# Altium schematic symbol library Vibration_Datalogger.SchLib: 75 symbols (part 3 of 7)
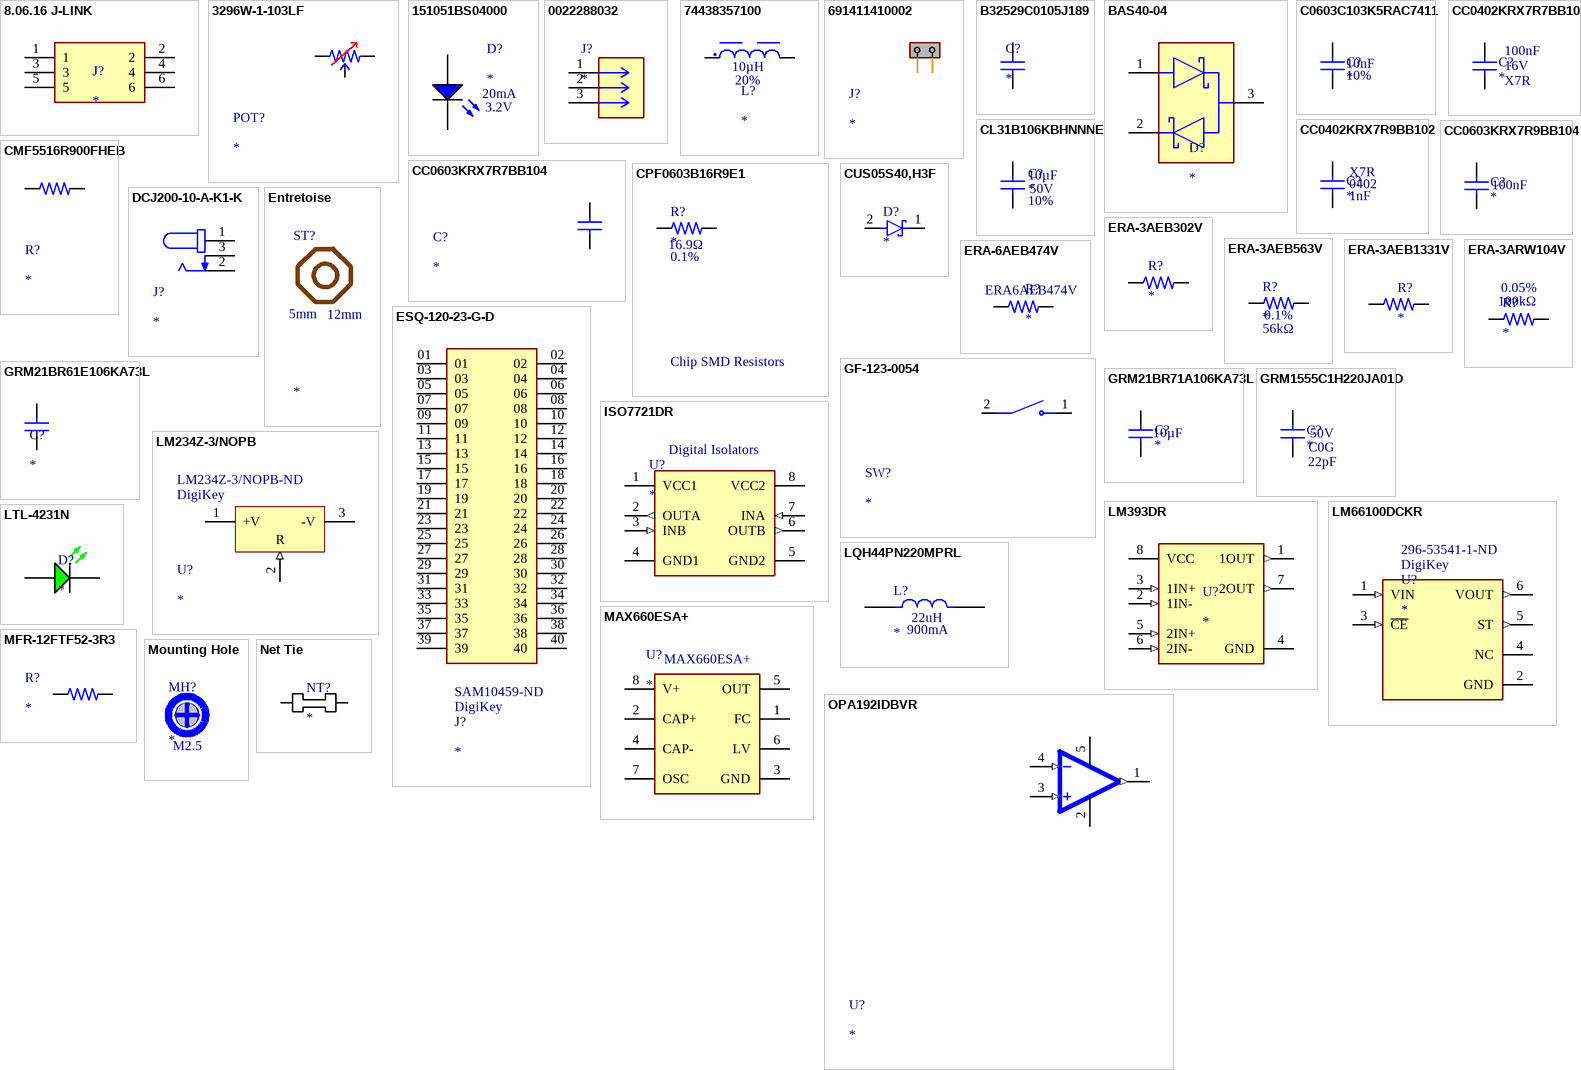
[diagram p3: symbols 8.06.16 J-LINK to OPA192IDBVR]

## ERA-3AEB1331V
designator R?
RES SMD 1.33KOHM 0.1% 1/10W 0603; Manufacturer Lifecycle Status: ACTIVE; Part Series: Thin Film Chip Resistors, High Reliability Type; Manufacturer: Panasonic; Manufacturer Part Number: ERA3AEB1331V; Max Power Dissipation: 100mW; Resistance: 1.33kΩ; Temperature Coefficient: 25ppm/°C; Voltage Rating: 150V; Voltage Rating (DC): 75V; Case/Package: 0603; Case Code (Imperial): 0603; Case Code (Metric): 1608; Composition: Thin Film; Contact Plating: Tin; Depth: 800µm; Features: Automotive AEC-Q200; Height: 450µm; Height - Seated (Max): 558.8µm; Lead Free: Lead Free; Length: 1.6mm; Lifecycle Status: Production; Max Operating Temperature: 155°C; Military Standard: Not; Min Operating Temperature: -55°C; Mount: Surface Mount; Number of Pins: 2; Number of Terminals: 2; Number of Terminations: 2; Packaging: Tape & Reel; Power Rating: 100mW; Radiation Hardening: No; Ratings: AEC-Q200; REACH SVHC: Yes; Schedule B: 8533210045, 8533210045|8533210045, 8533210045|8533210045|8533210045, 8533210045|8533210045|8533210045|8533210045; Termination: SMD/SMT; Tolerance: 0.1%; Width: 800µm; Working Voltage: 75V; ComponentLink1URL: https://datasheet.octopart.com:443/ERA3AEB1331V-Panasonic-datasheet-181959660.pdf?src-supplier=IHS; ComponentLink1Description: https://datasheet.octopart.com:443/ERA3AEB1331V-Panasonic-datasheet-181959660.pdf?src-supplier=IHS; ComponentLink2URL: https://datasheet.octopart.com:443/ERA3AEB1331V-Panasonic-datasheet-62287448.pdf?src-supplier=Newark; ComponentLink2Description: https://datasheet.octopart.com:443/ERA3AEB1331V-Panasonic-datasheet-62287448.pdf?src-supplier=Newark; ComponentLink3URL: https://datasheet.octopart.com:443/ERA3AEB1331V-Panasonic-datasheet-136531316.pdf?src-supplier=Newark; ComponentLink3Description: https://datasheet.octopart.com:443/ERA3AEB1331V-Panasonic-datasheet-136531316.pdf?src-supplier=Newark; ComponentLink4URL: https://datasheet.octopart.com:443/ERA-3AEB1331V-Panasonic-datasheet-154766165.pdf?src-supplier=Master+Electronics; ComponentLink4Description: https://datasheet.octopart.com:443/ERA-3AEB1331V-Panasonic-datasheet-154766165.pdf?src-supplier=Master+Electronics; ComponentLink5URL: https://datasheet.octopart.com:443/ERA3AEB1331V-Panasonic-datasheet-8367715.pdf?src-supplier=Farnell; ComponentLink5Description: https://datasheet.octopart.com:443/ERA3AEB1331V-Panasonic-datasheet-8367715.pdf?src-supplier=Farnell; ComponentLink6URL: https://datasheet.octopart.com:443/ERA3AEB1331V-Panasonic---ECG-datasheet-15994758.pdf?src-supplier=Farnell; ComponentLink6Description: https://datasheet.octopart.com:443/ERA3AEB1331V-Panasonic---ECG-datasheet-15994758.pdf?src-supplier=Farnell; ComponentLink7URL: https://datasheet.octopart.com:443/ERA3AEB1331V-Panasonic-datasheet-188913046.pdf?src-supplier=TME; ComponentLink7Description: https://datasheet.octopart.com:443/ERA3AEB1331V-Panasonic-datasheet-188913046.pdf?src-supplier=TME; ComponentLink8URL: https://sigma.octopart.com:443/150570796/technical_drawing/Panasonic-ERA3AEB1331V.pdf?src-supplier=Panasonic+SCT; ComponentLink8Description: https://sigma.octopart.com:443/150570796/technical_drawing/Panasonic-ERA3AEB1331V.pdf?src-supplier=Panasonic+SCT; ComponentLink9URL: https://datasheet.octopart.com:443/ERA3AEB1331V-Panasonic-datasheet-138783076.pdf?src-supplier=Burklin+Elektronik; ComponentLink9Description: https://datasheet.octopart.com:443/ERA3AEB1331V-Panasonic-datasheet-138783076.pdf?src-supplier=Burklin+Elektronik; ComponentLink10URL: https://datasheet.octopart.com/ERA3AEB1331V-Panasonic-datasheet-78375410.pdf; ComponentLink10Description: https://datasheet.octopart.com/ERA3AEB1331V-Panasonic-datasheet-78375410.pdf; ComponentLink11URL: https://datasheet.octopart.com:443/ERA-3AEB1331V-Panasonic-datasheet-62096640.pdf?src-supplier=Future+Electronics; ComponentLink11Description: https://datasheet.octopart.com:443/ERA-3AEB1331V-Panasonic-datasheet-62096640.pdf?src-supplier=Future+Electronics; ComponentLink12URL: https://datasheet.octopart.com:443/ERA3AEB1331V-Panasonic-datasheet-13266200.pdf?src-supplier=Electro+Sonic; ComponentLink12Description: https://datasheet.octopart.com:443/ERA3AEB1331V-Panasonic-datasheet-13266200.pdf?src-supplier=Electro+Sonic; ComponentLink13URL: https://datasheet.octopart.com:443/ERA3AEB1331V-Panasonic-datasheet-33006989.pdf?src-supplier=Electro+Sonic; ComponentLink13Description: https://datasheet.octopart.com:443/ERA3AEB1331V-Panasonic-datasheet-33006989.pdf?src-supplier=Electro+Sonic; ComponentLink14URL: https://datasheet.octopart.com:443/ERA-3AEB1331V-Panasonic-datasheet-46744048.pdf?src-supplier=Electro+Sonic; ComponentLink14Description: https://datasheet.octopart.com:443/ERA-3AEB1331V-Panasonic-datasheet-46744048.pdf?src-supplier=Electro+Sonic; Supplier 1: DigiKey; Supplier Part Number 1: P1.33KDBDKR-ND; Category: Chip SMD Resistors
footprint ERA-3AEB1331V (RES SMD 1.33KOHM 0.1% 1/10W 0603)
pins: 1, 2

## ERA-3ARW104V
designator R?  Tolerance: 0.05%  Resistance: 100kΩ
RES SMD 100KOHM 0.05% 1/10W 0603; Manufacturer Lifecycle Status: ACTIVE; Part Series: Thin Film Chip Resistors, High Reliability Type; Manufacturer: Panasonic; Manufacturer Part Number: ERA3ARW104V; Max Power Dissipation: 100mW; Temperature Coefficient: 10ppm/°C; Voltage Rating: 150V; Voltage Rating (DC): 75V; Case/Package: 0603; Case Code (Imperial): 0603; Case Code (Metric): 1608; Composition: Metal Film, Thin Film; Contact Plating: Tin; Depth: 800µm; Height: 450µm; Lead Free: Lead Free; Length: 1.6mm; Lifecycle Status: Production; Max Operating Temperature: 155°C; Military Standard: Not; Min Operating Temperature: -55°C; Mount: Surface Mount; Number of Pins: 2; Number of Terminals: 2; Number of Terminations: 2; Packaging: Cut Tape; Power Dissipation: 100mW; Power Rating: 100mW; Radiation Hardening: No; Ratings: AEC-Q200; REACH SVHC: Yes; Schedule B: 8533210045, 8533210045|8533210045|8533210045|8533210045|8533210045|8533210045|8533210045|8533210045|8533210045|8533210045|8533210045|8533210045|8533210045|8533210045|8533210045|8533210045|8533210045|8533210045|8533210045|8533210045|8533210045|8533210045|8533210045|85; Width: 800µm; Working Voltage: 75V; ComponentLink1URL: https://datasheet.octopart.com:443/ERA3ARW104V-Panasonic-datasheet-181959660.pdf?src-supplier=IHS; ComponentLink1Description: https://datasheet.octopart.com:443/ERA3ARW104V-Panasonic-datasheet-181959660.pdf?src-supplier=IHS; ComponentLink2URL: https://datasheet.octopart.com:443/ERA3ARW104V-Panasonic-datasheet-62287448.pdf?src-supplier=Future+Electronics; ComponentLink2Description: https://datasheet.octopart.com:443/ERA3ARW104V-Panasonic-datasheet-62287448.pdf?src-supplier=Future+Electronics; ComponentLink3URL: https://datasheet.octopart.com:443/ERA3ARW104V-Panasonic-datasheet-136531316.pdf?src-supplier=Newark; ComponentLink3Description: https://datasheet.octopart.com:443/ERA3ARW104V-Panasonic-datasheet-136531316.pdf?src-supplier=Newark; ComponentLink4URL: https://datasheet.octopart.com:443/ERA3ARW104V-Panasonic-datasheet-5310081.pdf?src-supplier=Newark; ComponentLink4Description: https://datasheet.octopart.com:443/ERA3ARW104V-Panasonic-datasheet-5310081.pdf?src-supplier=Newark; ComponentLink5URL: https://datasheet.octopart.com:443/ERA-3ARW104V-Panasonic-datasheet-154766165.pdf?src-supplier=Master+Electronics; ComponentLink5Description: https://datasheet.octopart.com:443/ERA-3ARW104V-Panasonic-datasheet-154766165.pdf?src-supplier=Master+Electronics; ComponentLink6URL: https://datasheet.octopart.com:443/ERA3ARW104V-Panasonic-datasheet-13266200.pdf?src-supplier=Electro+Sonic; ComponentLink6Description: https://datasheet.octopart.com:443/ERA3ARW104V-Panasonic-datasheet-13266200.pdf?src-supplier=Electro+Sonic; ComponentLink7URL: https://datasheet.octopart.com:443/ERA-3ARW104V-Panasonic-datasheet-33006989.pdf?src-supplier=Electro+Sonic; ComponentLink7Description: https://datasheet.octopart.com:443/ERA-3ARW104V-Panasonic-datasheet-33006989.pdf?src-supplier=Electro+Sonic; ComponentLink8URL: https://sigma.octopart.com:443/150570796/technical_drawing/Panasonic-ERA3ARW104V.pdf?src-supplier=Panasonic+SCT; ComponentLink8Description: https://sigma.octopart.com:443/150570796/technical_drawing/Panasonic-ERA3ARW104V.pdf?src-supplier=Panasonic+SCT; ComponentLink9URL: https://datasheet.octopart.com/ERA3ARW104V-Panasonic-datasheet-78375410.pdf; ComponentLink9Description: https://datasheet.octopart.com/ERA3ARW104V-Panasonic-datasheet-78375410.pdf; Category: Chip SMD Resistors; Supplier 1: DigiKey; Supplier Part Number 1: P100KBECT-ND
footprint ERA-3ARW104V (RES SMD 100KOHM 0.05% 1/10W 0603)
pins: 1, 2

## ERA-6AEB474V
designator R?  Manufacturer Part Number: ERA6AEB474V
RES SMD 470K OHM 0.1% 1/8W 0805; Manufacturer Lifecycle Status: ACTIVE; Part Series: Thin Film Chip Resistors, High Reliability Type; Manufacturer: Panasonic; Max Power Dissipation: 125mW; Resistance: 470kΩ; Temperature Coefficient: 25ppm/°C; Voltage Rating: 100V; Case/Package: 0805; Case Code (Imperial): 0805; China RoHS: Non-Compliant; Composition: Metal Film, Thin Film; Contact Plating: Tin; Country of Origin: Japan; Depth: 1.25mm; Export Control Classification Number (ECCN) Code: EAR99; Features: Automotive AEC-Q200; Height: 500µm; Harmonized Tariff Schedule (HTS) Code: 8533.21.00.30; Introduction Date: 2006-05-29; Lead Free: Lead Free; Length: 2mm; Lifecycle Status: Production; Max Operating Temperature: 155°C; Military Standard: Not; Min Operating Temperature: -55°C; Mount: Surface Mount; Number of Pins: 2; Number of Terminals: 2; Number of Terminations: 2; Packaging: Cut Tape; Power Dissipation: 125mW; Power Rating: 125mW; Radiation Hardening: No; REACH SVHC: Yes; Schedule B: 8533210045, 8533210045|8533210045|8533210045|8533210045|8533210045; Termination: SMD/SMT; Tolerance: 0.1%; Voltage Rating (DC): 100V; Width: 1.25mm; Working Voltage: 100V; ComponentLink1URL: https://datasheet.octopart.com:443/ERA6AEB474V-Panasonic-datasheet-181959660.pdf?src-supplier=IHS; ComponentLink1Description: https://datasheet.octopart.com:443/ERA6AEB474V-Panasonic-datasheet-181959660.pdf?src-supplier=IHS; ComponentLink2URL: https://datasheet.octopart.com/ERA6AEB474V-Panasonic-datasheet-62287448.pdf; ComponentLink2Description: https://datasheet.octopart.com/ERA6AEB474V-Panasonic-datasheet-62287448.pdf; ComponentLink3URL: https://datasheet.octopart.com/ERA6AEB474V-Panasonic-datasheet-78375410.pdf; ComponentLink3Description: https://datasheet.octopart.com/ERA6AEB474V-Panasonic-datasheet-78375410.pdf; ComponentLink4URL: https://datasheet.octopart.com:443/ERA6AEB474V-Panasonic-datasheet-136531316.pdf?src-supplier=Newark; ComponentLink4Description: https://datasheet.octopart.com:443/ERA6AEB474V-Panasonic-datasheet-136531316.pdf?src-supplier=Newark; ComponentLink5URL: https://datasheet.octopart.com:443/ERA-6AEB474V-Panasonic-datasheet-8367715.pdf?src-supplier=Newark; ComponentLink5Description: https://datasheet.octopart.com:443/ERA-6AEB474V-Panasonic-datasheet-8367715.pdf?src-supplier=Newark; ComponentLink6URL: https://datasheet.octopart.com:443/ERA-6AEB474V-Panasonic-datasheet-61114971.pdf?src-supplier=Newark; ComponentLink6Description: https://datasheet.octopart.com:443/ERA-6AEB474V-Panasonic-datasheet-61114971.pdf?src-supplier=Newark; ComponentLink7URL: https://datasheet.octopart.com:443/ERA6AEB474V-Panasonic-datasheet-118567.pdf?src-supplier=element14; ComponentLink7Description: https://datasheet.octopart.com:443/ERA6AEB474V-Panasonic-datasheet-118567.pdf?src-supplier=element14; ComponentLink8URL: https://datasheet.octopart.com:443/ERA-6AEB474V-Panasonic-datasheet-154766165.pdf?src-supplier=JRH+Electronics; ComponentLink8Description: https://datasheet.octopart.com:443/ERA-6AEB474V-Panasonic-datasheet-154766165.pdf?src-supplier=JRH+Electronics; ComponentLink9URL: https://datasheet.octopart.com:443/ERA6AEB474V-Panasonic-datasheet-188913046.pdf?src-supplier=TME; ComponentLink9Description: https://datasheet.octopart.com:443/ERA6AEB474V-Panasonic-datasheet-188913046.pdf?src-supplier=TME; ComponentLink10URL: https://sigma.octopart.com:443/150570796/technical_drawing/Panasonic-ERA6AEB474V.pdf?src-supplier=Panasonic+SCT; ComponentLink10Description: https://sigma.octopart.com:443/150570796/technical_drawing/Panasonic-ERA6AEB474V.pdf?src-supplier=Panasonic+SCT; ComponentLink11URL: https://datasheet.octopart.com:443/ERA6AEB474V-Panasonic-datasheet-138783076.pdf?src-supplier=Burklin+Elektronik; ComponentLink11Description: https://datasheet.octopart.com:443/ERA6AEB474V-Panasonic-datasheet-138783076.pdf?src-supplier=Burklin+Elektronik; ComponentLink12URL: https://datasheet.octopart.com:443/ERA6AEB474V-Panasonic---ECG-datasheet-15994758.pdf?src-supplier=Farnell; ComponentLink12Description: https://datasheet.octopart.com:443/ERA6AEB474V-Panasonic---ECG-datasheet-15994758.pdf?src-supplier=Farnell; ComponentLink13URL: https://datasheet.octopart.com:443/ERA-6AEB474V-Panasonic-datasheet-13266200.pdf?src-supplier=Electro+Sonic; ComponentLink13Description: https://datasheet.octopart.com:443/ERA-6AEB474V-Panasonic-datasheet-13266200.pdf?src-supplier=Electro+Sonic; ComponentLink14URL: https://datasheet.octopart.com:443/ERA-6AEB474V-Panasonic-datasheet-33006989.pdf?src-supplier=Electro+Sonic; ComponentLink14Description: https://datasheet.octopart.com:443/ERA-6AEB474V-Panasonic-datasheet-33006989.pdf?src-supplier=Electro+Sonic; ComponentLink15URL: https://datasheet.octopart.com:443/ERA-6AEB474V-Panasonic-datasheet-46744048.pdf?src-supplier=Electro+Sonic; ComponentLink15Description: https://datasheet.octopart.com:443/ERA-6AEB474V-Panasonic-datasheet-46744048.pdf?src-supplier=Electro+Sonic; Supplier 1: DigiKey; Supplier Part Number 1: P470KDACT-ND; Category: Chip SMD Resistors
footprint ERA-6AEB474V (RES SMD 470K OHM 0.1% 1/8W 0805)
pins: 1, 2

## ESQ-120-23-G-D
designator J?  Supplier 1: DigiKey  Supplier Part Number 1: SAM10459-ND
CONN SOCKET 40POS 0.1 GOLD PCB
footprint ESQ-120-23-G-D (CONN SOCKET 40POS 0.1 GOLD PCB)
pins: 01, 02, 03, 04, 05, 06, 07, 08, 09, 10, 11, 12, 13, 14, 15, 16, 17, 18, 19, 20, 21, 22, 23, 24, 25, 26, 27, 28, 29, 30, 31, 32, 33, 34, 35, 36, 37, 38, 39, 40

## GF-123-0054
designator SW?
SWITCH SLIDE SPST 8.5A 125V; Manufacturer: CW Industries; Manufacturer Part Number: GF-123-0054; Actuator Length: 5.08mm; Actuator Material: Nylon, Polyamide; Electrical Life: 6kcycles; Mechanical Life: 10kcycles; Number of Positions: 1; Switch Function: On-Off; Switch Travel: 3.61mm; Contact Material: Copper; Contact Plating: Silver; Country of Origin: USA; Current Rating: 8.5A; Export Control Classification Number (ECCN) Code: EAR99; Height: 8.51mm; Harmonized Tariff Schedule (HTS) Code: 8536.50.90.50; Introduction Date: 2016-05-13; Length: 16.46mm; Lifecycle Status: Production; Max Operating Temperature: 104°C; Min Operating Temperature: -10°C; Mount: Through Hole; REACH SVHC: Yes; Termination: Solder; Throw Configuration: SPST; Voltage Rating (AC): 125V; Voltage Rating (DC): 125V; ComponentLink1URL: https://datasheet.octopart.com:443/GF-123-0054-CW-Industries-datasheet-180444882.pdf?src-supplier=IHS; ComponentLink1Description: https://datasheet.octopart.com:443/GF-123-0054-CW-Industries-datasheet-180444882.pdf?src-supplier=IHS; ComponentLink2URL: https://datasheet.octopart.com:443/GF-123-0054-CW-Industries-datasheet-159152559.pdf?src-supplier=Master+Electronics; ComponentLink2Description: https://datasheet.octopart.com:443/GF-123-0054-CW-Industries-datasheet-159152559.pdf?src-supplier=Master+Electronics; Supplier 1: DigiKey; Supplier Part Number 1: CWI333-ND; Category: Slide Switches
footprint GF-123-0054 (SWITCH SLIDE SPST 8.5A 125V)
pins: 1, 2

## GRM21BR61E106KA73L
designator C?
CAP CER 10UF 25V X5R 0805; Manufacturer Lifecycle Status: IN PRODUCTION; Manufacturer: Murata; Manufacturer Part Number: GRM21BR61E106KA73L; Capacitance: 10µF; Dielectric Material: Ceramic; Tolerance: 10%; Case/Package: 0805; Case Code (Imperial): 0805; Case Code (Metric): 2012; Country of Origin: Japan, Mainland China, Philippines, Singapore, Thailand; Depth: 1.25mm; Dielectric: X5R; Export Control Classification Number (ECCN) Code: EAR99; Height: 1.25mm; Harmonized Tariff Schedule (HTS) Code: 8532.24.00.20; Introduction Date: 2012-06-14; Lead Free: Lead Free; Length: 2mm; Lifecycle Status: Production; Material: Ceramic; Max Operating Temperature: 85°C; Min Operating Temperature: -55°C; Mount: Surface Mount; Number of Pins: 2; Number of Terminals: 2; Radiation Hardening: No; REACH SVHC: Yes; Schedule B: 8532240020, 8532240020|8532240020, 8532240020|8532240020|8532240020, 8532240020|8532240020|8532240020|8532240020; Termination: SMD/SMT; Thickness: 1.25mm; Voltage: 25V; Voltage Rating: 25V; Voltage Rating (DC): 25V; Width: 1.25mm; ComponentLink1URL: https://datasheet.octopart.com:443/GRM21BR61E106KA73L-Murata-datasheet-99353849.pdf?src-supplier=Upverter; ComponentLink1Description: https://datasheet.octopart.com:443/GRM21BR61E106KA73L-Murata-datasheet-99353849.pdf?src-supplier=Upverter; ComponentLink2URL: https://datasheet.octopart.com:443/GRM21BR61E106KA73L-Murata-datasheet-8080374.pdf?src-supplier=Upverter; ComponentLink2Description: https://datasheet.octopart.com:443/GRM21BR61E106KA73L-Murata-datasheet-8080374.pdf?src-supplier=Upverter; ComponentLink3URL: https://datasheet.octopart.com:443/GRM21BR61E106KA73L-Murata-datasheet-10030887.pdf?src-supplier=element14+APAC; ComponentLink3Description: https://datasheet.octopart.com:443/GRM21BR61E106KA73L-Murata-datasheet-10030887.pdf?src-supplier=element14+APAC; ComponentLink4URL: https://datasheet.octopart.com:443/GRM21BR61E106KA73L-Murata-datasheet-62320250.pdf?src-supplier=element14+APAC; ComponentLink4Description: https://datasheet.octopart.com:443/GRM21BR61E106KA73L-Murata-datasheet-62320250.pdf?src-supplier=element14+APAC; ComponentLink5URL: https://datasheet.octopart.com:443/GRM21BR61E106KA73L-Murata-datasheet-141278247.pdf?src-supplier=Geoflip; ComponentLink5Description: https://datasheet.octopart.com:443/GRM21BR61E106KA73L-Murata-datasheet-141278247.pdf?src-supplier=Geoflip; ComponentLink6URL: https://datasheet.octopart.com/GRM21BR61E106KA73L-Murata-datasheet-12515295.pdf; ComponentLink6Description: https://datasheet.octopart.com/GRM21BR61E106KA73L-Murata-datasheet-12515295.pdf; ComponentLink7URL: https://datasheet.octopart.com/GRM21BR61E106KA73L-Murata-datasheet-12510076.pdf; ComponentLink7Description: https://datasheet.octopart.com/GRM21BR61E106KA73L-Murata-datasheet-12510076.pdf; ComponentLink8URL: https://datasheet.octopart.com/GRM21BR61E106KA73L-Murata-datasheet-11978611.pdf; ComponentLink8Description: https://datasheet.octopart.com/GRM21BR61E106KA73L-Murata-datasheet-11978611.pdf; ComponentLink9URL: https://datasheet.octopart.com/GRM21BR61E106KA73L-Murata-datasheet-10025737.pdf; ComponentLink9Description: https://datasheet.octopart.com/GRM21BR61E106KA73L-Murata-datasheet-10025737.pdf; ComponentLink10URL: https://datasheet.octopart.com/GRM21BR61E106KA73L-Murata-datasheet-8819587.pdf; ComponentLink10Description: https://datasheet.octopart.com/GRM21BR61E106KA73L-Murata-datasheet-8819587.pdf; ComponentLink11URL: https://datasheet.octopart.com/GRM21BR61E106KA73L-Murata-datasheet-14397508.pdf; ComponentLink11Description: https://datasheet.octopart.com/GRM21BR61E106KA73L-Murata-datasheet-14397508.pdf; ComponentLink12URL: https://datasheet.octopart.com:443/GRM21BR61E106KA73L-Murata-datasheet-11549874.pdf?src-supplier=Seeed+Studio; ComponentLink12Description: https://datasheet.octopart.com:443/GRM21BR61E106KA73L-Murata-datasheet-11549874.pdf?src-supplier=Seeed+Studio; ComponentLink13URL: https://datasheet.octopart.com:443/GRM21BR61E106KA73L-Murata-datasheet-17853673.pdf?src-supplier=Newark; ComponentLink13Description: https://datasheet.octopart.com:443/GRM21BR61E106KA73L-Murata-datasheet-17853673.pdf?src-supplier=Newark; ComponentLink14URL: https://datasheet.octopart.com:443/GRM21BR61E106KA73L-Murata-datasheet-165579666.pdf?src-supplier=TME; ComponentLink14Description: https://datasheet.octopart.com:443/GRM21BR61E106KA73L-Murata-datasheet-165579666.pdf?src-supplier=TME; ComponentLink15URL: https://datasheet.octopart.com:443/GRM21BR61E106KA73L-Murata-datasheet-59876780.pdf?src-supplier=TME; ComponentLink15Description: https://datasheet.octopart.com:443/GRM21BR61E106KA73L-Murata-datasheet-59876780.pdf?src-supplier=TME; ComponentLink16URL: https://datasheet.octopart.com:443/GRM21BR61E106KA73L-Murata-datasheet-140707569.pdf?src-supplier=Ciiva; ComponentLink16Description: https://datasheet.octopart.com:443/GRM21BR61E106KA73L-Murata-datasheet-140707569.pdf?src-supplier=Ciiva; ComponentLink17URL: https://datasheet.octopart.com:443/GRM21BR61E106KA73L-Murata-datasheet-138744870.pdf?src-supplier=Ciiva; ComponentLink17Description: https://datasheet.octopart.com:443/GRM21BR61E106KA73L-Murata-datasheet-138744870.pdf?src-supplier=Ciiva; ComponentLink18URL: https://datasheet.octopart.com:443/GRM21BR61E106KA73L-Murata-datasheet-22122223.pdf?src-supplier=Future+Electronics; ComponentLink18Description: https://datasheet.octopart.com:443/GRM21BR61E106KA73L-Murata-datasheet-22122223.pdf?src-supplier=Future+Electronics; ComponentLink19URL: https://datasheet.octopart.com:443/GRM21BR61E106KA73L-Murata-datasheet-12551729.pdf?src-supplier=Future+Electronics; ComponentLink19Description: https://datasheet.octopart.com:443/GRM21BR61E106KA73L-Murata-datasheet-12551729.pdf?src-supplier=Future+Electronics; ComponentLink20URL: https://datasheet.octopart.com:443/GRM21BR61E106KA73L-Murata-datasheet-7550257.pdf?src-supplier=Farnell; ComponentLink20Description: https://datasheet.octopart.com:443/GRM21BR61E106KA73L-Murata-datasheet-7550257.pdf?src-supplier=Farnell; ComponentLink21URL: http://sigma.octopart.com:80/reach_statement/Murata-company-16.pdf?src-supplier=Compliance+Statements; ComponentLink21Description: http://sigma.octopart.com:80/reach_statement/Murata-company-16.pdf?src-supplier=Compliance+Statements; Supplier 1: DigiKey; Supplier Part Number 1: 490-5523-1-ND; Category: Ceramic Capacitors
footprint GRM21BR61E106KA73L (CAP CER 10UF 25V X5R 0805)
pins: 1 P, 2 N

## GRM21BR71A106KA73L
designator C?  Capacitance: 10µF
CAP CER 10UF 10V X7R 0805; Manufacturer Lifecycle Status: IN PRODUCTION; Manufacturer Package Identifier: 0805 (2012 metric); Manufacturer: Murata; Manufacturer Part Number: GRM21BR71A106KA73L; Dielectric Material: Ceramic; Tolerance: 10%; Case/Package: 0805; Case Code (Imperial): 0805; Case Code (Metric): 2012; Country of Origin: Japan, Mainland China, Philippines, Singapore, Thailand; Depth: 1.25mm; Dielectric: X7R; Export Control Classification Number (ECCN) Code: EAR99; Height: 1.25mm; Harmonized Tariff Schedule (HTS) Code: 8532.24.00.20; Introduction Date: 2013-11-20; Length: 2mm; Lifecycle Status: Production; Material: Ceramic; Max Operating Temperature: 125°C; Min Operating Temperature: -55°C; Mount: Surface Mount; Number of Pins: 2; Number of Terminals: 2; REACH SVHC: Yes; Schedule B: 8532240020, 8532240020|8532240020, 8532240020|8532240020|8532240020, 8532240020|8532240020|8532240020|8532240020; Termination: SMD/SMT; Thickness: 1.25mm; Voltage Rating: 10V; Voltage Rating (DC): 10V; Weight: 9.49709mg; Width: 1.25mm; ComponentLink1URL: https://datasheet.octopart.com:443/GRM21BR71A106KA73L-Murata-datasheet-22122223.pdf?src-supplier=Upverter; ComponentLink1Description: https://datasheet.octopart.com:443/GRM21BR71A106KA73L-Murata-datasheet-22122223.pdf?src-supplier=Upverter; ComponentLink2URL: https://datasheet.octopart.com:443/GRM21BR71A106KA73L-Murata-datasheet-66077114.pdf?src-supplier=element14+APAC; ComponentLink2Description: https://datasheet.octopart.com:443/GRM21BR71A106KA73L-Murata-datasheet-66077114.pdf?src-supplier=element14+APAC; ComponentLink3URL: https://datasheet.octopart.com:443/GRM21BR71A106KA73L-Murata-datasheet-165579666.pdf?src-supplier=TME; ComponentLink3Description: https://datasheet.octopart.com:443/GRM21BR71A106KA73L-Murata-datasheet-165579666.pdf?src-supplier=TME; ComponentLink4URL: https://datasheet.octopart.com:443/GRM21BR71A106KA73L-Murata-datasheet-140707598.pdf?src-supplier=Ciiva; ComponentLink4Description: https://datasheet.octopart.com:443/GRM21BR71A106KA73L-Murata-datasheet-140707598.pdf?src-supplier=Ciiva; ComponentLink5URL: https://datasheet.octopart.com:443/GRM21BR71A106KA73L-Murata-datasheet-138744898.pdf?src-supplier=Ciiva; ComponentLink5Description: https://datasheet.octopart.com:443/GRM21BR71A106KA73L-Murata-datasheet-138744898.pdf?src-supplier=Ciiva; ComponentLink6URL: https://datasheet.octopart.com/GRM21BR71A106KA73L-Murata-datasheet-12515295.pdf; ComponentLink6Description: https://datasheet.octopart.com/GRM21BR71A106KA73L-Murata-datasheet-12515295.pdf; ComponentLink7URL: https://datasheet.octopart.com/GRM21BR71A106KA73L-Murata-datasheet-12510076.pdf; ComponentLink7Description: https://datasheet.octopart.com/GRM21BR71A106KA73L-Murata-datasheet-12510076.pdf; ComponentLink8URL: https://datasheet.octopart.com/GRM21BR71A106KA73L-Murata-datasheet-11978611.pdf; ComponentLink8Description: https://datasheet.octopart.com/GRM21BR71A106KA73L-Murata-datasheet-11978611.pdf; ComponentLink9URL: https://datasheet.octopart.com/GRM21BR71A106KA73L-Murata-datasheet-10025737.pdf; ComponentLink9Description: https://datasheet.octopart.com/GRM21BR71A106KA73L-Murata-datasheet-10025737.pdf; ComponentLink10URL: https://datasheet.octopart.com/GRM21BR71A106KA73L-Murata-datasheet-8819587.pdf; ComponentLink10Description: https://datasheet.octopart.com/GRM21BR71A106KA73L-Murata-datasheet-8819587.pdf; ComponentLink11URL: https://datasheet.octopart.com/GRM21BR71A106KA73L-Murata-datasheet-38883396.pdf; ComponentLink11Description: https://datasheet.octopart.com/GRM21BR71A106KA73L-Murata-datasheet-38883396.pdf; ComponentLink12URL: https://datasheet.octopart.com:443/GRM21BR71A106KA73L-Murata-datasheet-151172660.pdf?src-supplier=Arrow.cn; ComponentLink12Description: https://datasheet.octopart.com:443/GRM21BR71A106KA73L-Murata-datasheet-151172660.pdf?src-supplier=Arrow.cn; ComponentLink13URL: http://sigma.octopart.com:80/reach_statement/Murata-company-16.pdf?src-supplier=Compliance+Statements; ComponentLink13Description: http://sigma.octopart.com:80/reach_statement/Murata-company-16.pdf?src-supplier=Compliance+Statements; Supplier 1: DigiKey; Supplier Part Number 1: 490-10516-1-ND; Category: Ceramic Capacitors
footprint GRM21BR71A106KA73L (CAP CER 10UF 10V X7R 0805)
pins: 1 P, 2 N

## GRM1555C1H220JA01D
designator C?  Voltage: 50V  Dielectric: C0G  Capacitance: 22pF
CAP CER 22PF 50V C0G/NP0 0402; Manufacturer: Murata; Manufacturer Part Number: GRM1555C1H220JA01D; Dielectric Material: Ceramic; Tolerance: 5%; Case/Package: 0402; Case Code (Imperial): 0402; Case Code (Metric): 1005; Depth: 500µm; Height: 500µm; Lead Free: Lead Free; Length: 1mm; Lifecycle Status: Production; Material: Ceramic; Max Operating Temperature: 125°C; Min Operating Temperature: -55°C; Mount: Surface Mount; Number of Terminals: 2; Packaging: Cut Tape; Radiation Hardening: No; REACH SVHC: Yes; Schedule B: 8532240020, 8532240020|8532240020|8532240020|8532240020|8532240020; Termination: SMD/SMT; Thickness: 500µm; Voltage Rating: 50V; Voltage Rating (DC): 50V; Width: 500µm; ComponentLink1URL: https://datasheet.octopart.com:443/GRM1555C1H220JA01D-Murata-datasheet-141913788.pdf?src-supplier=Upverter; ComponentLink1Description: https://datasheet.octopart.com:443/GRM1555C1H220JA01D-Murata-datasheet-141913788.pdf?src-supplier=Upverter; ComponentLink2URL: https://datasheet.octopart.com:443/GRM1555C1H220JA01D-Murata-datasheet-12559435.pdf?src-supplier=element14+APAC; ComponentLink2Description: https://datasheet.octopart.com:443/GRM1555C1H220JA01D-Murata-datasheet-12559435.pdf?src-supplier=element14+APAC; ComponentLink3URL: https://datasheet.octopart.com:443/GRM1555C1H220JA01D-Murata-datasheet-62317060.pdf?src-supplier=element14+APAC; ComponentLink3Description: https://datasheet.octopart.com:443/GRM1555C1H220JA01D-Murata-datasheet-62317060.pdf?src-supplier=element14+APAC; ComponentLink4URL: https://datasheet.octopart.com:443/GRM1555C1H220JA01D-Murata-datasheet-141266224.pdf?src-supplier=Ciiva; ComponentLink4Description: https://datasheet.octopart.com:443/GRM1555C1H220JA01D-Murata-datasheet-141266224.pdf?src-supplier=Ciiva; ComponentLink5URL: https://datasheet.octopart.com:443/GRM1555C1H220JA01D-Murata-datasheet-140681354.pdf?src-supplier=Ciiva; ComponentLink5Description: https://datasheet.octopart.com:443/GRM1555C1H220JA01D-Murata-datasheet-140681354.pdf?src-supplier=Ciiva; ComponentLink6URL: https://datasheet.octopart.com:443/GRM1555C1H220JA01D-Murata-datasheet-138739516.pdf?src-supplier=Ciiva; ComponentLink6Description: https://datasheet.octopart.com:443/GRM1555C1H220JA01D-Murata-datasheet-138739516.pdf?src-supplier=Ciiva; ComponentLink7URL: https://datasheet.octopart.com:443/GRM1555C1H220JA01D-Murata-datasheet-120101189.pdf?src-supplier=Megastar; ComponentLink7Description: https://datasheet.octopart.com:443/GRM1555C1H220JA01D-Murata-datasheet-120101189.pdf?src-supplier=Megastar; ComponentLink8URL: https://datasheet.octopart.com:443/GRM1555C1H220JA01D-Murata-datasheet-81455556.pdf?src-supplier=TME; ComponentLink8Description: https://datasheet.octopart.com:443/GRM1555C1H220JA01D-Murata-datasheet-81455556.pdf?src-supplier=TME; ComponentLink9URL: https://datasheet.octopart.com:443/GRM1555C1H220JA01D-Murata-datasheet-22122223.pdf?src-supplier=Future+Electronics; ComponentLink9Description: https://datasheet.octopart.com:443/GRM1555C1H220JA01D-Murata-datasheet-22122223.pdf?src-supplier=Future+Electronics; ComponentLink10URL: https://datasheet.octopart.com:443/GRM1555C1H220JA01D-Murata-datasheet-12510170.pdf?src-supplier=Future+Electronics; ComponentLink10Description: https://datasheet.octopart.com:443/GRM1555C1H220JA01D-Murata-datasheet-12510170.pdf?src-supplier=Future+Electronics; ComponentLink11URL: https://datasheet.octopart.com:443/GRM1555C1H220JA01D-Murata-datasheet-8517407.pdf?src-supplier=Future+Electronics; ComponentLink11Description: https://datasheet.octopart.com:443/GRM1555C1H220JA01D-Murata-datasheet-8517407.pdf?src-supplier=Future+Electronics; ComponentLink12URL: https://datasheet.octopart.com:443/GRM1555C1H220JA01D-Murata-datasheet-8387045.pdf?src-supplier=Future+Electronics; ComponentLink12Description: https://datasheet.octopart.com:443/GRM1555C1H220JA01D-Murata-datasheet-8387045.pdf?src-supplier=Future+Electronics; ComponentLink13URL: https://datasheet.octopart.com:443/GRM1555C1H220JA01D-Murata-datasheet-8324201.pdf?src-supplier=Future+Electronics; ComponentLink13Description: https://datasheet.octopart.com:443/GRM1555C1H220JA01D-Murata-datasheet-8324201.pdf?src-supplier=Future+Electronics; ComponentLink14URL: https://datasheet.octopart.com:443/GRM1555C1H220JA01D-Murata-datasheet-7628724.pdf?src-supplier=Future+Electronics; ComponentLink14Description: https://datasheet.octopart.com:443/GRM1555C1H220JA01D-Murata-datasheet-7628724.pdf?src-supplier=Future+Electronics; ComponentLink15URL: https://datasheet.octopart.com:443/GRM1555C1H220JA01D-Murata-datasheet-552801.pdf?src-supplier=Future+Electronics; ComponentLink15Description: https://datasheet.octopart.com:443/GRM1555C1H220JA01D-Murata-datasheet-552801.pdf?src-supplier=Future+Electronics; ComponentLink16URL: https://datasheet.octopart.com:443/GRM1555C1H220JA01D-Murata-datasheet-44781475.pdf?src-supplier=Future+Electronics; ComponentLink16Description: https://datasheet.octopart.com:443/GRM1555C1H220JA01D-Murata-datasheet-44781475.pdf?src-supplier=Future+Electronics; ComponentLink17URL: https://datasheet.octopart.com/GRM1555C1H220JA01D-Murata-datasheet-12515295.pdf; ComponentLink17Description: https://datasheet.octopart.com/GRM1555C1H220JA01D-Murata-datasheet-12515295.pdf; ComponentLink18URL: https://datasheet.octopart.com/GRM1555C1H220JA01D-Murata-datasheet-12510076.pdf; ComponentLink18Description: https://datasheet.octopart.com/GRM1555C1H220JA01D-Murata-datasheet-12510076.pdf; ComponentLink19URL: https://datasheet.octopart.com/GRM1555C1H220JA01D-Murata-datasheet-11978611.pdf; ComponentLink19Description: https://datasheet.octopart.com/GRM1555C1H220JA01D-Murata-datasheet-11978611.pdf; ComponentLink20URL: https://datasheet.octopart.com/GRM1555C1H220JA01D-Murata-datasheet-10025737.pdf; ComponentLink20Description: https://datasheet.octopart.com/GRM1555C1H220JA01D-Murata-datasheet-10025737.pdf; ComponentLink21URL: https://datasheet.octopart.com/GRM1555C1H220JA01D-Murata-datasheet-8819587.pdf; ComponentLink21Description: https://datasheet.octopart.com/GRM1555C1H220JA01D-Murata-datasheet-8819587.pdf; ComponentLink22URL: https://datasheet.octopart.com/GRM1555C1H220JA01D-Murata-datasheet-14396388.pdf; ComponentLink22Description: https://datasheet.octopart.com/GRM1555C1H220JA01D-Murata-datasheet-14396388.pdf; ComponentLink23URL: http://sigma.octopart.com:80/reach_statement/Murata-company-16.pdf?src-supplier=Compliance+Statements; ComponentLink23Description: http://sigma.octopart.com:80/reach_statement/Murata-company-16.pdf?src-supplier=Compliance+Statements; Supplier Part Number 1: 490-5868-6-ND; Category: Ceramic Capacitors; Supplier 1: DigiKey
footprint GRM1555C1H220JA01D (CAP CER 22PF 50V C0G/NP0 0402)
pins: 1 P, 2 N

## ISO7721DR
designator U?  Category: Digital Isolators
DGTL ISOLTR 3KV 2CH GP 8-SOIC; Manufacturer Lifecycle Status: ACTIVE; Manufacturer: Texas Instruments; Manufacturer Part Number: ISO7721DR; Max Junction Temperature (Tj): 150°C; Max Supply Voltage: 5.5V; Min Supply Voltage: 2.25V; Number of Channels: 2; Ambient Temperature Range High: 125°C; Case/Package: SOIC; Height: 1.75mm; Length: 4.9mm; Lifecycle Status: Production; Max Operating Temperature: 125°C; Min Operating Temperature: -55°C; Number of Pins: 8; Schedule B: 8542390000; Thickness: 1.58mm; Width: 3.91mm; ComponentLink1URL: https://sigma.octopart.com:443/49249642/technical_drawing/Texas-Instruments-ISO7721DR.pdf?src-supplier=Texas+Instruments; ComponentLink1Description: https://sigma.octopart.com:443/49249642/technical_drawing/Texas-Instruments-ISO7721DR.pdf?src-supplier=Texas+Instruments; ComponentLink2URL: https://octopart.com:443/opatz8j6/c1?t=N4i5HTB15HvroLgDRCjPCIOLO4DzHH-fQ7glQtrdPT8sKYBxLvew8ldYt0gu1Pel5IQCJ2ZGdcFq2bwaeQ7N0Chny3VNsxZ6HuHivyfwJquNCYjdfOKu54ML7MfV023Ysdhw82XVyVOy21wx84OrzKQpnromuLfqbRUaNxLZ02VTg2_LKSTziiXX6iiXfCvXpXSEGq7Dxekm_jYx4fBYM5_MAdjqp1279_2INQEdLFzUa7b4C_IDFYUqO0fe7EAQa8YcTah4U8QRTj4XYb2n7LUQT2Lqk4_3jb4YPU1OmiSTSs3OhXIKqXgyrN1px5SDhoov6XcKqy42gYH0QjWerchXv21b-9W2m4NZyJWzqHCqOz-kWukKjjAVIfL9cPcO0XaB4IM&src-supplier=Texas+Instruments; ComponentLink2Description: https://octopart.com:443/opatz8j6/c1?t=N4i5HTB15HvroLgDRCjPCIOLO4DzHH-fQ7glQtrdPT8sKYBxLvew8ldYt0gu1Pel5IQCJ2ZGdcFq2bwaeQ7N0Chny3VNsxZ6HuHivyfwJquNCYjdfOKu54ML7MfV023Ysdhw82XVyVOy21wx84OrzKQpnromuLfqbRUaNxLZ02VTg2_LKSTziiXX6iiXfCvXpXSEGq7Dxekm_jYx4fBYM5_MAdjqp1279_2INQEdLFzUa7b4C_IDFYUqO0fe7EAQa8YcTah4U8QRTj4XYb2n7LUQT2Lqk4_3jb4YPU1OmiSTSs3OhXIKqXgyrN1px5SDhoov6XcKqy42gYH0QjWerchXv21b-9W2m4NZyJWzqHCqOz-kWukKjjAVIfL9cPcO0XaB4IM&src-supplier=Texas+Instruments; ComponentLink3URL: https://datasheet.octopart.com:443/ISO7721DR-Texas-Instruments-datasheet-164414773.pdf?src-supplier=Augswan; ComponentLink3Description: https://datasheet.octopart.com:443/ISO7721DR-Texas-Instruments-datasheet-164414773.pdf?src-supplier=Augswan; ComponentLink4URL: https://datasheet.octopart.com:443/ISO7721DR-Texas-Instruments-datasheet-184973186.pdf?src-supplier=Future+Electronics; ComponentLink4Description: https://datasheet.octopart.com:443/ISO7721DR-Texas-Instruments-datasheet-184973186.pdf?src-supplier=Future+Electronics; ComponentLink5URL: https://datasheet.octopart.com:443/ISO7721DR-Texas-Instruments-datasheet-165803939.pdf?src-supplier=LCSC; ComponentLink5Description: https://datasheet.octopart.com:443/ISO7721DR-Texas-Instruments-datasheet-165803939.pdf?src-supplier=LCSC; ComponentLink6URL: https://datasheet.octopart.com:443/ISO7721DR-Texas-Instruments-datasheet-163726784.pdf?src-supplier=LCSC; ComponentLink6Description: https://datasheet.octopart.com:443/ISO7721DR-Texas-Instruments-datasheet-163726784.pdf?src-supplier=LCSC; ComponentLink7URL: http://sigma.octopart.com:80/reach_statement/Texas-Instruments-company-64.pdf?src-supplier=Compliance+Statements; ComponentLink7Description: http://sigma.octopart.com:80/reach_statement/Texas-Instruments-company-64.pdf?src-supplier=Compliance+Statements; ComponentLink8URL: http://sigma.octopart.com:80/conflict_mineral_statement/Texas-Instruments-company-63.pdf?src-supplier=Compliance+Statements; ComponentLink8Description: http://sigma.octopart.com:80/conflict_mineral_statement/Texas-Instruments-company-63.pdf?src-supplier=Compliance+Statements; Supplier 1: DigiKey; Supplier Part Number 1: 296-48296-1-ND
footprint ISO7721DR (DGTL ISOLTR 3KV 2CH GP 8-SOIC)
pins: 1 VCC1 (power), 2 OUTA (out), 3 INB (in), 4 GND1 (power), 5 GND2 (power), 6 OUTB (out), 7 INA (in), 8 VCC2 (power)

## LM234Z-3/NOPB
designator U?  Supplier 1: DigiKey  Supplier Part Number 1: LM234Z-3/NOPB-ND
Current Source, 3-Terminal Adjustable, True Temperature Sensor, Plastic TO-92; Manufacturer Lifecycle Status: ACTIVE; Accuracy: 3%; Element Configuration: Single; Forward Current: 10mA; Forward Voltage: 30V; Max Input Voltage: 40V; Min Input Voltage: 1V; Min Supply Voltage: 800mV; Number of Outputs: 1; Output Type: ANALOG; Tolerance: 1%; Case/Package: TO-92; Contact Plating: Tin; Height: 5.34mm; Length: 4.3mm; Lifecycle Status: Production; Max Operating Temperature: 100°C; Max Supply Voltage: 40V; Min Operating Temperature: -25°C; Mount: Through Hole; Number of Pins: 3; Output Current: 10mA; Packaging: Bulk; Radiation Hardening: No; REACH SVHC: No; Reference Type: Adjustable; Schedule B: 8542390000, 8542390000|8542390000|8542390000|8542390000|8542390000; Thickness: 3.6mm; Weight: 113.398093g; Width: 4.3mm; ComponentLink1URL: https://sigma.octopart.com:443/186639543/technical_drawing/Texas-Instruments-LM234Z-3-NOPB.pdf?src-supplier=Texas+Instruments; ComponentLink1Description: https://sigma.octopart.com:443/186639543/technical_drawing/Texas-Instruments-LM234Z-3-NOPB.pdf?src-supplier=Texas+Instruments; ComponentLink2URL: https://octopart.com:443/opatz8j6/c1?t=e2RhRCzYr4BaemLKaI6Kyl3dLkHRe8cPAR4nziHvLPZ6u3jocPbqPLczMX_qB1TjFc-rJuwH_w-1wo1QGmPhsZ1mqhfKdPD5jpPqpl7yftw6J2g7-DTlU3_2G7dKSwHwSh6eukuUpBIPfNV1XT-9p1oyGC5G5eJiZKdnpuoPpf5EaSVhUsFdMRU3maN4bF8ozYEKU_jysdVImzqDi1TDLCJdrref1n5n5_0vXDw3MPju_9xOun07LLv6P4X42jtso8hs6KAV3GADMlBCLxlwsMx1u6oXZTSS6Wxl3egRpprv4mlbr_xSjL6X3a2EknwEBnBODLJqNHpw2tFUkmIOCRVZvCq3Oa3d8Eedi_f1nUyBT_fc1nqfr2u4_9z82xhjLH8&src-supplier=Texas+Instruments; ComponentLink2Description: https://octopart.com:443/opatz8j6/c1?t=e2RhRCzYr4BaemLKaI6Kyl3dLkHRe8cPAR4nziHvLPZ6u3jocPbqPLczMX_qB1TjFc-rJuwH_w-1wo1QGmPhsZ1mqhfKdPD5jpPqpl7yftw6J2g7-DTlU3_2G7dKSwHwSh6eukuUpBIPfNV1XT-9p1oyGC5G5eJiZKdnpuoPpf5EaSVhUsFdMRU3maN4bF8ozYEKU_jysdVImzqDi1TDLCJdrref1n5n5_0vXDw3MPju_9xOun07LLv6P4X42jtso8hs6KAV3GADMlBCLxlwsMx1u6oXZTSS6Wxl3egRpprv4mlbr_xSjL6X3a2EknwEBnBODLJqNHpw2tFUkmIOCRVZvCq3Oa3d8Eedi_f1nUyBT_fc1nqfr2u4_9z82xhjLH8&src-supplier=Texas+Instruments; ComponentLink3URL: https://datasheet.octopart.com:443/LM234Z-3-NOPB-Texas-Instruments-datasheet-37129293.pdf?src-supplier=Texas+Instruments; ComponentLink3Description: https://datasheet.octopart.com:443/LM234Z-3-NOPB-Texas-Instruments-datasheet-37129293.pdf?src-supplier=Texas+Instruments; ComponentLink4URL: https://sigma.octopart.com:443/81678662/technical_drawing/Texas-Instruments-LM234Z-3-NOPB.pdf?src-supplier=Texas+Instruments; ComponentLink4Description: https://sigma.octopart.com:443/81678662/technical_drawing/Texas-Instruments-LM234Z-3-NOPB.pdf?src-supplier=Texas+Instruments; ComponentLink5URL: https://sigma.octopart.com:443/49250678/technical_drawing/Texas-Instruments-LM234Z-3-NOPB.pdf?src-supplier=Texas+Instruments; ComponentLink5Description: https://sigma.octopart.com:443/49250678/technical_drawing/Texas-Instruments-LM234Z-3-NOPB.pdf?src-supplier=Texas+Instruments; ComponentLink6URL: https://datasheet.octopart.com:443/LM234Z-3-NOPB-Texas-Instruments-datasheet-15827902.pdf?src-supplier=Texas+Instruments; ComponentLink6Description: https://datasheet.octopart.com:443/LM234Z-3-NOPB-Texas-Instruments-datasheet-15827902.pdf?src-supplier=Texas+Instruments; ComponentLink7URL: https://datasheet.octopart.com:443/LM234Z-3-NOPB-Texas-Instruments-datasheet-15031981.pdf?src-supplier=Texas+Instruments; ComponentLink7Description: https://datasheet.octopart.com:443/LM234Z-3-NOPB-Texas-Instruments-datasheet-15031981.pdf?src-supplier=Texas+Instruments; ComponentLink8URL: https://datasheet.octopart.com:443/LM234Z-3/NOPB-Texas-Instruments-datasheet-10669237.pdf?src-supplier=Verical; ComponentLink8Description: https://datasheet.octopart.com:443/LM234Z-3/NOPB-Texas-Instruments-datasheet-10669237.pdf?src-supplier=Verical; ComponentLink9URL: https://datasheet.octopart.com:443/LM234Z-3/NOPB-National-Semiconductor-datasheet-31214.pdf?src-supplier=Future+Electronics; ComponentLink9Description: https://datasheet.octopart.com:443/LM234Z-3/NOPB-National-Semiconductor-datasheet-31214.pdf?src-supplier=Future+Electronics; ComponentLink10URL: https://datasheet.octopart.com:443/LM234Z-3-NOPB-Texas-Instruments-datasheet-65712963.pdf?src-supplier=Newark; ComponentLink10Description: https://datasheet.octopart.com:443/LM234Z-3-NOPB-Texas-Instruments-datasheet-65712963.pdf?src-supplier=Newark; ComponentLink11URL: https://datasheet.octopart.com:443/LM234Z-3-NOPB-Texas-Instruments-datasheet-32045309.pdf?src-supplier=Newark; ComponentLink11Description: https://datasheet.octopart.com:443/LM234Z-3-NOPB-Texas-Instruments-datasheet-32045309.pdf?src-supplier=Newark; ComponentLink12URL: https://datasheet.octopart.com:443/LM234Z-3-NOPB-Texas-Instruments-datasheet-27908155.pdf?src-supplier=Farnell; ComponentLink12Description: https://datasheet.octopart.com:443/LM234Z-3-NOPB-Texas-Instruments-datasheet-27908155.pdf?src-supplier=Farnell; ComponentLink13URL: https://datasheet.octopart.com:443/LM234Z-3-NOPB-Texas-Instruments-datasheet-26823820.pdf?src-supplier=Farnell; ComponentLink13Description: https://datasheet.octopart.com:443/LM234Z-3-NOPB-Texas-Instruments-datasheet-26823820.pdf?src-supplier=Farnell; ComponentLink14URL: https://datasheet.octopart.com:443/LM234Z-3-NOPB-Texas-Instruments-datasheet-20860903.pdf?src-supplier=element14+APAC; ComponentLink14Description: https://datasheet.octopart.com:443/LM234Z-3-NOPB-Texas-Instruments-datasheet-20860903.pdf?src-supplier=element14+APAC; ComponentLink15URL: https://datasheet.octopart.com:443/LM234Z-3-NOPB-Texas-Instruments-datasheet-159115105.pdf?src-supplier=SHENGYU+ELECTRONICS; ComponentLink15Description: https://datasheet.octopart.com:443/LM234Z-3-NOPB-Texas-Instruments-datasheet-159115105.pdf?src-supplier=SHENGYU+ELECTRONICS; ComponentLink16URL: https://datasheet.octopart.com:443/LM234Z-3-NOPB-Texas-Instruments-datasheet-83038145.pdf?src-supplier=TME; ComponentLink16Description: https://datasheet.octopart.com:443/LM234Z-3-NOPB-Texas-Instruments-datasheet-83038145.pdf?src-supplier=TME; ComponentLink17URL: https://datasheet.octopart.com:443/LM234Z-3-NOPB-Texas-Instruments-datasheet-16809449.pdf?src-supplier=TME; ComponentLink17Description: https://datasheet.octopart.com:443/LM234Z-3-NOPB-Texas-Instruments-datasheet-16809449.pdf?src-supplier=TME; ComponentLink18URL: https://datasheet.octopart.com:443/LM234Z-3/NOPB-National-Semiconductor-datasheet-9767840.pdf?src-supplier=RS+(Formerly+Allied+Electronics); ComponentLink18Description: https://datasheet.octopart.com:443/LM234Z-3/NOPB-National-Semiconductor-datasheet-9767840.pdf?src-supplier=RS+(Formerly+Allied+Electronics); ComponentLink19URL: https://datasheet.octopart.com:443/LM234Z-3-NOPB-Texas-Instruments-datasheet-8200682.pdf?src-supplier=Jameco; ComponentLink19Description: https://datasheet.octopart.com:443/LM234Z-3-NOPB-Texas-Instruments-datasheet-8200682.pdf?src-supplier=Jameco; ComponentLink20URL: http://sigma.octopart.com:80/reach_statement/Texas-Instruments-company-64.pdf?src-supplier=Compliance+Statements; ComponentLink20Description: http://sigma.octopart.com:80/reach_statement/Texas-Instruments-company-64.pdf?src-supplier=Compliance+Statements; ComponentLink21URL: http://sigma.octopart.com:80/conflict_mineral_statement/Texas-Instruments-company-63.pdf?src-supplier=Compliance+Statements; ComponentLink21Description: http://sigma.octopart.com:80/conflict_mineral_statement/Texas-Instruments-company-63.pdf?src-supplier=Compliance+Statements
footprint LM234Z-3/NOPB (IC CURRENT SOURCE 1% TO92-3)
pins: 1 +V, 2 R (in), 3 -V

## LM393DR
designator U?
IC COMPARATOR 2 DIFF 8SOIC
footprint LM393DR (IC COMPARATOR 2 DIFF 8SOIC)
pins: 1 1OUT (out), 2 1IN- (in), 3 1IN+ (in), 4 GND (power), 5 2IN+ (in), 6 2IN- (in), 7 2OUT (out), 8 VCC (power)